# EAGLE library part MAX98357A (library orb)
Analog/Maxim MAX98357AETE+T I2S Class D amplifier (TQFN-16)
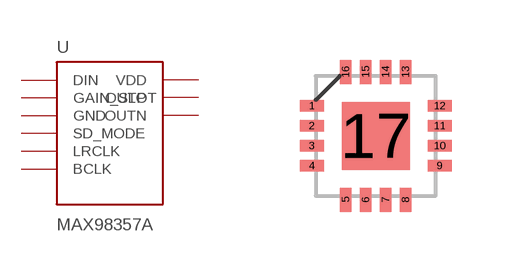
[diagram p5: symbol with the pads of TQFN16_3X3; footprint TQFN16_3X3]

Designator prefix U

## MAX98357A  [TQFN16_3X3]
1  DIN  pas
2  GAIN_SLOT  pas
3  GND  pas
4  SD_MODE  pas
7  VDD  pas
8  VDD  pas
9  OUTP  pas
10  OUTN  pas
11  GND  pas
14  LRCLK  pas
15  GND  pas
16  BCLK  pas
17  GND  pas

## Footprint TQFN16_3X3 (pad centres in mm)
TQFN-16 3 x 3 mm, 0.5 mm pitch, exposed pad 1.7 x 1.7. IPC-style pads: verify against the Analog Devices land pattern
smd 0.6 x 0.28: 1 -1.6,0.75; 2 -1.6,0.25; 3 -1.6,-0.25; 4 -1.6,-0.75; 9 1.6,-0.75; 10 1.6,-0.25; 11 1.6,0.25; 12 1.6,0.75
smd 0.28 x 0.6: 5 -0.75,-1.6; 6 -0.25,-1.6; 7 0.25,-1.6; 8 0.75,-1.6; 13 0.75,1.6; 14 0.25,1.6; 15 -0.25,1.6; 16 -0.75,1.6
smd 1.7 x 1.7: 17 0,0